# EAGLE library part CON_RASPBERRYPI (library dp_devices.v6)
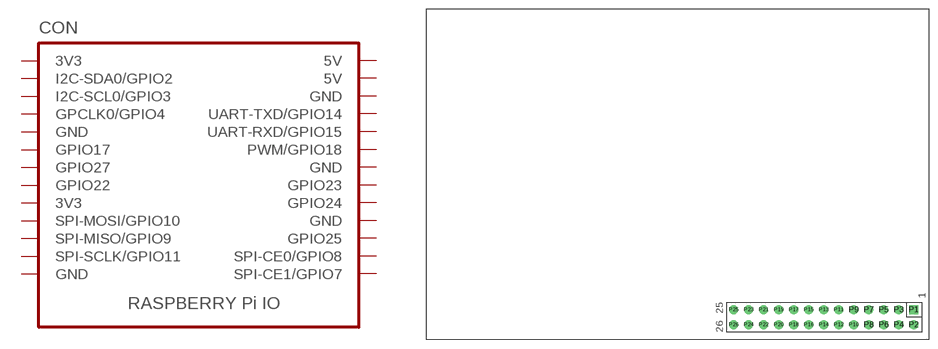
[diagram p148: symbol with the pads of CON_RASPBERRYPI; footprint CON_RASPBERRYPI]

Designator prefix CON

## CON_RASPBERRYPI  [CON_RASPBERRYPI]
P1  3V3  sup
P2  5V  sup
P3  I2C-SDA0/GPIO2
P4  5V  pwr
P5  I2C-SCL0/GPIO3
P6  GND  pwr
P7  GPCLK0/GPIO4
P8  UART-TXD/GPIO14
P9  GND  pwr
P10  UART-RXD/GPIO15
P11  GPIO17
P12  PWM/GPIO18
P13  GPIO27
P14  GND  pwr
P15  GPIO22
P16  GPIO23
P17  3V3  pwr
P18  GPIO24
P19  SPI-MOSI/GPIO10
P20  GND  pwr
P21  SPI-MISO/GPIO9
P22  GPIO25
P23  SPI-SCLK/GPIO11
P24  SPI-CE0/GPIO8
P25  GND  pwr
P26  SPI-CE1/GPIO7

## Footprint CON_RASPBERRYPI (pad centres in mm)
Raspberry Pi blank expansion board v1.0
drill 1 square: P1 82.46,5.08
drill 1: P2 82.46,2.54; P3 79.92,5.08; P4 79.92,2.54; P5 77.38,5.08; P6 77.38,2.54; P7 74.84,5.08; P8 74.84,2.54; P9 72.3,5.08; P10 72.3,2.54; P11 69.76,5.08; P12 69.76,2.54; P13 67.22,5.08; P14 67.22,2.54; P15 64.68,5.08; P16 64.68,2.54; P17 62.14,5.08; P18 62.14,2.54; P19 59.6,5.08; P20 59.6,2.54; P21 57.06,5.08; P22 57.06,2.54; P23 54.52,5.08; P24 54.52,2.54; P25 51.98,5.08; P26 51.98,2.54